# Altium footprint library IC.PcbLib: 204 footprints (part 9 of 13)
Each footprint in its own frame and in the unit in brackets; x right, y up, seen from the top. Pads: shape width x height; smd on the part's side, far side on the other; paste and mask are expansions set on the pad; w line width, h text height; cw(c..) or ccw(c..) is an arc to the next point about the centre after c.
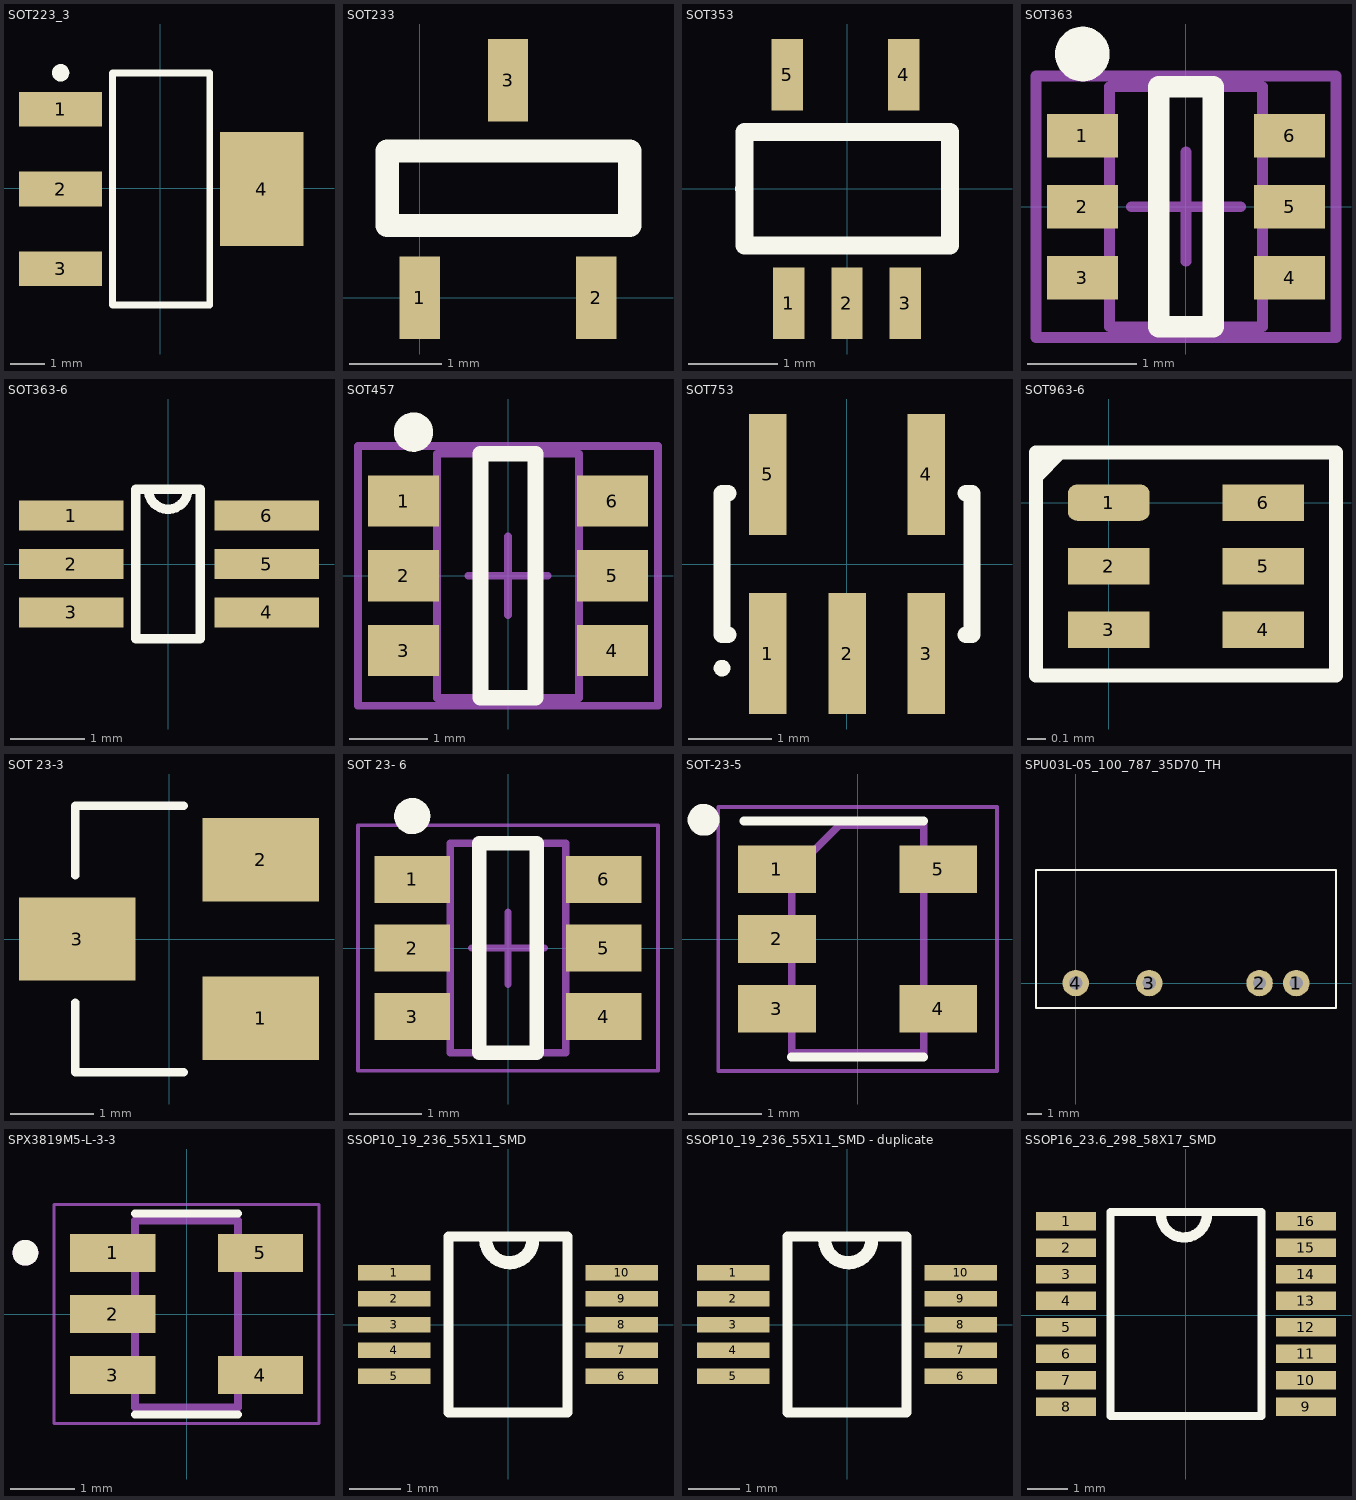
[diagram p8: the footprints below, top view; thin cyan lines are the x and y axes]

## SOT223_3 [mm] "CASE: SOT223"
height 1.8
pads (4):
  rect 2.4x1 smd: 1(-2.875,2.275) 2(-2.875,-0.025) 3(-2.875,-2.325)
  rect 2.4x3.3 smd: 4(2.925,-0.025)
Top Overlay:
  circle w0.25: c-2.875,3.325 r0.125
  lines w0.2: -1.375,-3.375 -1.375,3.325 1.425,3.325 1.425,-3.375 -1.375,-3.375
3D body "User Library-SOT223-3.step": height 1.7, standoff 0, extent -3.729,-3.275 3.271,3.225

## SOT233 [mm]
pads (3):
  rect 0.44x0.9 smd: 1(0,0) 2(1.92,0) 3(0.96,2.37)
Top Overlay:
  lines w0.254: -0.356,0.787 2.286,0.787 2.286,1.6 -0.356,1.6 -0.356,0.787
3D body "User Library-SOT23-3.step": height 1.3, standoff 0, extent -0.434,-0.13 2.466,2.67

## SOT353 [mm] "SOT-353/SC-88A; 5 Leads; Body 2.2 x 2.2 mm, inc. leads (LxW max)"
height 1.1
pads (5):
  rect 0.35x0.8 smd: 1(-0.65,-1.276) 2(0,-1.276) 3(0.65,-1.276) 4(0.635,1.27) 5(-0.665,1.27)
Top Overlay:
  lines w0.2: -1.15,0 -1.143,0 -1.143,-0.635 1.15,-0.635 1.15,0.127 1.15,0.635 -1.143,0.635 -1.143,-0.254
3D body "User Library-SOT353-1.step": height 1.1, standoff 0, extent -1.1,-1.2 1.1,1.2

## SOT363 [mm] "SOT363, 6-Leads, Body 2x1.3mm, Pitch 0.65mm, Lead Span 2.1mm, IPC High Density"
height 1.1
pads (6):
  rect 0.65x0.4 smd: 1(-0.95,0.65) 2(-0.95,0) 3(-0.95,-0.65) 4(0.95,-0.65) 5(0.95,0) 6(0.95,0.65)
Top Overlay:
  circle w0.25: c-0.95,1.4 r0.125
  lines w0.2: -0.25,-1.1 -0.25,1.1 0.25,1.1 0.25,-1.1 -0.25,-1.1
Mechanical 13:
  lines w0.1: -0.7,-1.1 0.7,-1.1 0.7,1.1 -0.7,1.1 -0.7,-1.1
Mechanical 15:
  lines w0.1: -0.5,0 0.5,0 ; 0,-0.5 0,0.5 ; -1.375,-1.2 1.375,-1.2 1.375,1.2 -1.375,1.2 -1.375,-1.2
3D body "User Library-SOT363-2.step": height 1.1, standoff 0, extent -1.2,-1.1 1.2,1.1

## SOT363-6 [mm] "SOT363"
height 1.1
pads (6):
  rect 1.4x0.4 smd mask+0.076: 1(-1.3,0.65) 2(-1.3,0) 3(-1.3,-0.65) 4(1.325,-0.65) 5(1.325,0) 6(1.325,0.65)
Top Overlay:
  lines w0.127: -0.265,1 ccw(c0,1) 0.265,1 ; -0.432,-1 0.432,-1 0.432,1 -0.432,1 -0.432,-1
3D body "74AUP2G3404GW,125.stp": height 1.1, standoff 0, extent -1.05,-1 1.05,1

## SOT457 [mm] "SOT23, 6-Leads, Body 2.9x1.5mm, Pitch 0.95mm, Lead Span 2.8mm, IPC High Density"
height 1.1
pads (6):
  rect 0.9x0.65 smd: 1(-1.327,0.95) 2(-1.327,0) 3(-1.327,-0.95) 4(1.327,-0.95) 5(1.327,0) 6(1.327,0.95)
Top Overlay:
  circle w0.25: c-1.2,1.825 r0.125
  lines w0.2: -0.35,-1.55 -0.35,1.55 0.35,1.55 0.35,-1.55 -0.35,-1.55
Mechanical 13:
  lines w0.1: -0.9,-1.55 0.9,-1.55 0.9,1.55 -0.9,1.55 -0.9,-1.55
Mechanical 15:
  lines w0.1: -0.5,0 0.5,0 ; 0,-0.5 0,0.5 ; -1.905,-1.65 1.905,-1.65 1.905,1.65 -1.905,1.65 -1.905,-1.65
3D body "User Library-SOT23-6.step": height 1.3, standoff 0, extent -1.5,-1.5 1.5,1.5

## SOT753 [mm] "SOT-23/SC-74A; 5 Leads; Body 3.1 x 3 mm, inc. leads (LxW max)"
height 1.1
pads (5):
  rect 0.45x1.45 smd: 1(-0.95,-1.075) 2(0,-1.075) 3(0.95,-1.075) 4(0.95,1.075) 5(-0.95,1.075)
Top Overlay:
  circle w0.1: c-1.5,-1.25 r0.05
  lines w0.2: -1.425,-0.85 -1.5,-0.85 -1.5,0.85 -1.425,0.85 ; 1.425,-0.85 1.5,-0.85 1.5,0.85 1.425,0.85
3D body "User Library-SOT753.step": height 1.1, standoff 0, extent -1.55,-1.5 1.55,1.5

## SOT963-6 [mm] "Mosfet"
height 0.4
pads (6):
  rrect50% 0.45x0.2 smd paste+0 mask+0.051: 1(0,0)
  rect 0.45x0.2 smd paste+0 mask+0.051: 2(0,-0.35) 3(0,-0.7) 4(0.85,-0.7) 5(0.85,-0.35) 6(0.85,0)
Top Overlay:
  region: -0.4,0.275 -0.216,0.275 -0.4,0.091
  lines w0.076: -0.4,-0.95 -0.4,0.275 1.25,0.275 1.25,-0.95 -0.4,-0.95

## SOT 23-3 [mm] "Case: SOT23"
height 1.1
pads (3):
  rect 1.4x1 smd paste+0 mask+0.076: 1(1.1,-0.95) 2(1.1,0.95) 3(-1.1,0)
Top Overlay:
  lines w0.1: -1.125,-0.762 -1.125,-1.6 0.175,-1.6 ; -1.125,0.763 -1.125,1.6 0.175,1.6
3D body "SOT23_TO-236AA.STEP": height 1.3, standoff 0, extent -1.5,-1.5 1.5,1.5

## SOT 23- 6 [mm]
pads (6):
  rect 1.05x0.65 smd: 1(-1.325,0.95) 2(-1.325,0) 3(-1.325,-0.95) 4(1.325,-0.95) 5(1.325,0) 6(1.325,0.95)
Top Overlay:
  circle w0.25: c-1.325,1.825 r0.125
  lines w0.2: -0.4,-1.45 -0.4,1.45 0.4,1.45 0.4,-1.45 -0.4,-1.45
Mechanical 13:
  lines w0.1: -0.8,-1.45 0.8,-1.45 0.8,1.45 -0.8,1.45 -0.8,-1.45
Mechanical 15:
  lines w0.05: -2.075,-1.7 2.075,-1.7 2.075,1.7 -2.075,1.7 -2.075,-1.7
  lines w0.1: -0.5,0 0.5,0 ; 0,-0.5 0,0.5
3D body "SOT23-6.step": height 1.25, standoff 0, extent -1.422,-1.526 1.401,1.374

## SOT-23-5 [mm]
height 1.1
pads (5):
  rect 1.06x0.65 smd: 1(-1.1,0.95) 2(-1.1,0) 3(-1.1,-0.95) 4(1.1,-0.95) 5(1.1,0.95)
Top Overlay:
  circle w0.254: c-2.1,1.625 r0.09
  lines w0.12: -1.55,1.61 0.9,1.61 ; -0.9,-1.61 0.9,-1.61
Top Assembly:
  lines w0.05: -1.9,-1.8 1.9,-1.8 1.9,1.8 -1.9,1.8 -1.9,-1.8
Mechanical 15:
  lines w0.1: -0.9,-1.55 0.9,-1.55 0.9,1.55 -0.25,1.55 -0.9,0.9 -0.9,-1.55
3D body "SOT23-5.step": height 1.1, standoff 0, extent -1.25,-1.5 1.25,1.5

## SPU03L-05_100_787_35D70_TH [mm] "SPU03"
height 10.2
pads (4):
  round 1.8 hole 0.9: 1(15,0) 2(12.5,0) 3(5,0) 4(0,0)
Top Overlay:
  lines w0.127: -2.7,-1.7 17.7,-1.7 17.7,7.7 -2.7,7.7 -2.7,-1.7
3D body: height 10.2, standoff 0.25, extent -2.5,-1.5 17.5,7.5

## SPX3819M5-L-3-3 [mm]
height 1.45
pads (5):
  rect 1.32x0.59 smd paste+0 mask+0.102: 1(-1.145,0.95) 2(-1.145,0) 3(-1.145,-0.95) 4(1.145,-0.95) 5(1.145,0.95)
Top Overlay:
  circle w0.2: c-2.5,0.95 r0.1
  lines w0.127: -0.8,-1.56 0.8,-1.56 ; -0.8,1.56 0.8,1.56
Mechanical 13:
  circle w0.2: c-2.5,0.95 r0.1
  lines w0.127: -0.8,-1.45 0.8,-1.45 0.8,1.45 -0.8,1.45 -0.8,-1.45
Mechanical 15:
  lines w0.05: -2.055,-1.7 2.055,-1.7 2.055,1.7 -2.055,1.7 -2.055,-1.7
3D body "step_temp.STEP": height 1.45, standoff 0, extent -1.4,-1.45 1.4,1.45

## SSOP10_19_236_55X11_SMD [mm] "CASE: SSOP"
height 1.1
pads (10):
  rect 1.4x0.3 smd mask+0.076: 1(-2.2,1) 2(-2.2,0.5) 3(-2.2,0) 4(-2.2,-0.5) 5(-2.2,-1) 6(2.2,-1) 7(2.2,-0.5) 8(2.2,0) 9(2.2,0.5) 10(2.2,1)
Top Overlay:
  lines w0.2: -1.15,-1.702 -1.15,1.702 1.15,1.702 1.15,-1.702 -1.15,-1.702
  lines w0.254: -0.431,1.626 ccw(c0.025,1.651) 0.483,1.651
3D body "BUF04701AIDGSR.stp": height 1.1, standoff 0, extent -2.45,-1.5 2.45,1.5

## SSOP10_19_236_55X11_SMD - duplicate [mm] "CASE: SSOP"
height 1.1
pads (10):
  rect 1.4x0.3 smd mask+0.076: 1(-2.2,1) 2(-2.2,0.5) 3(-2.2,0) 4(-2.2,-0.5) 5(-2.2,-1) 6(2.2,-1) 7(2.2,-0.5) 8(2.2,0) 9(2.2,0.5) 10(2.2,1)
Top Overlay:
  lines w0.2: -1.15,-1.702 -1.15,1.702 1.15,1.702 1.15,-1.702 -1.15,-1.702
  lines w0.254: -0.431,1.626 ccw(c0.025,1.651) 0.483,1.651
3D body "BUF04701AIDGSR.stp": height 1.1, standoff 0, extent -2.45,-1.5 2.45,1.5

## SSOP16_23.6_298_58X17_SMD [mm] "CASE: SSOP"
height 2.65
pads (16):
  rect 1.475x0.45 smd: 1(-2.938,2.3) 2(-2.938,1.65) 3(-2.938,1) 4(-2.938,0.35) 5(-2.938,-0.3) 6(-2.938,-0.95) 7(-2.938,-1.6) 8(-2.938,-2.25) 9(2.938,-2.25) 10(2.938,-1.6) 11(2.938,-0.95) 12(2.938,-0.3) 13(2.938,0.35) 14(2.938,1) 15(2.938,1.65) 16(2.938,2.3)
Top Overlay:
  lines w0.2: -1.85,-2.475 -1.85,2.525 1.85,2.525 1.85,-2.475 -1.85,-2.475
  lines w0.254: -0.615,2.464 ccw(c-0.051,2.464) 0.513,2.483
3D body "NPIC6C596APWJ.stp": height 1.1, standoff 0, extent -3.2,-2.474 3.2,2.526